# Altium footprint library Guitar_Pedal.PcbLib: 2 footprints
Each footprint in its own frame and in the unit in brackets; x right, y up, seen from the top. Pads: shape width x height; smd on the part's side, far side on the other; paste and mask are expansions set on the pad; w line width, h text height; cw(c..) or ccw(c..) is an arc to the next point about the centre after c.
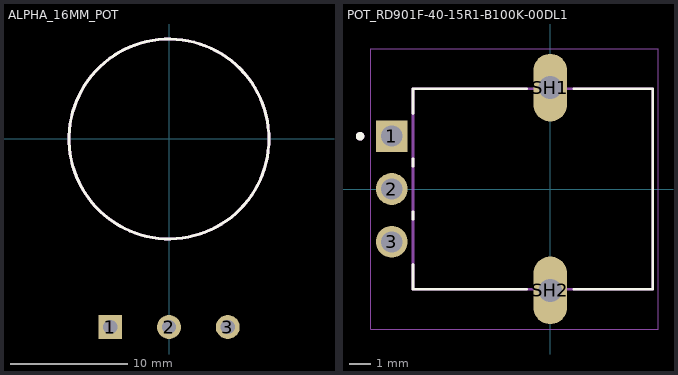
[diagram p0: the footprints below, top view; thin cyan lines are the x and y axes]

## ALPHA_16MM_POT [mm]
pads (3):
  rect 2.032x2.032 hole 1.2: 1(-5,-16)
  round 2.032 hole 1.2: 2(0,-16) 3(5,-16)
Top Overlay:
  circle w0.254: c0,0 r8.5
Mechanical 1:
  circle w0.254: c0,0 r8.5
3D body "ALPHA 16MM.STEP": height 25.75, standoff -4.95, extent -8.25,-16.25 8.25,8.25
3D body "Davies_1510 Knob.STEP": height 33.4, standoff 17.53, extent -9.513,-9.525 9.513,9.525

## POT_RD901F-40-15R1-B100K-00DL1 [mm]
height 25
pads (5):
  rect 1.508x1.508 / inner round 1.508 / far side rect 1.508x1.508 hole 1: 1(-7.5,2.5)
  round 1.508 hole 1: 2(-7.5,0) 3(-7.5,-2.5)
  oval 1.6x3.2 hole 1.1 square: SH1(0,4.8) SH2(0,-4.8)
Top Overlay:
  circle w0.2: c-9,2.5 r0.1
  lines w0.127: -6.5,-3.574 -6.5,-4.75 -1.12,-4.75 ; -6.5,-1.426 -6.5,-1.074 ; -6.5,1.074 -6.5,1.426 ; -6.5,3.574 -6.5,4.75 -1.12,4.75 ; 1.12,-4.75 4.85,-4.75 4.85,4.75 1.12,4.75
Mechanical 13:
  circle w0.2: c-9,2.5 r0.1
  lines w0.127: -6.5,-4.75 -6.5,4.75 4.85,4.75 4.85,-4.75 -6.5,-4.75
Mechanical 15:
  lines w0.05: -8.504,-6.65 -8.504,6.65 5.1,6.65 5.1,-6.65 -8.504,-6.65
3D body "step_temp.STEP": height 25, standoff -3.5, extent -7.777,-6 5.873,6
3D body "Davies_1510 Knob.STEP": height 31.11, standoff 15.24, extent -9.525,-9.513 9.525,9.513